# Altium footprint library ACB_PcbLib.PcbLib: 152 footprints (part 9 of 10)
Each footprint in its own frame and in the unit in brackets; x right, y up, seen from the top. Pads: shape width x height; smd on the part's side, far side on the other; paste and mask are expansions set on the pad; w line width, h text height; cw(c..) or ccw(c..) is an arc to the next point about the centre after c.
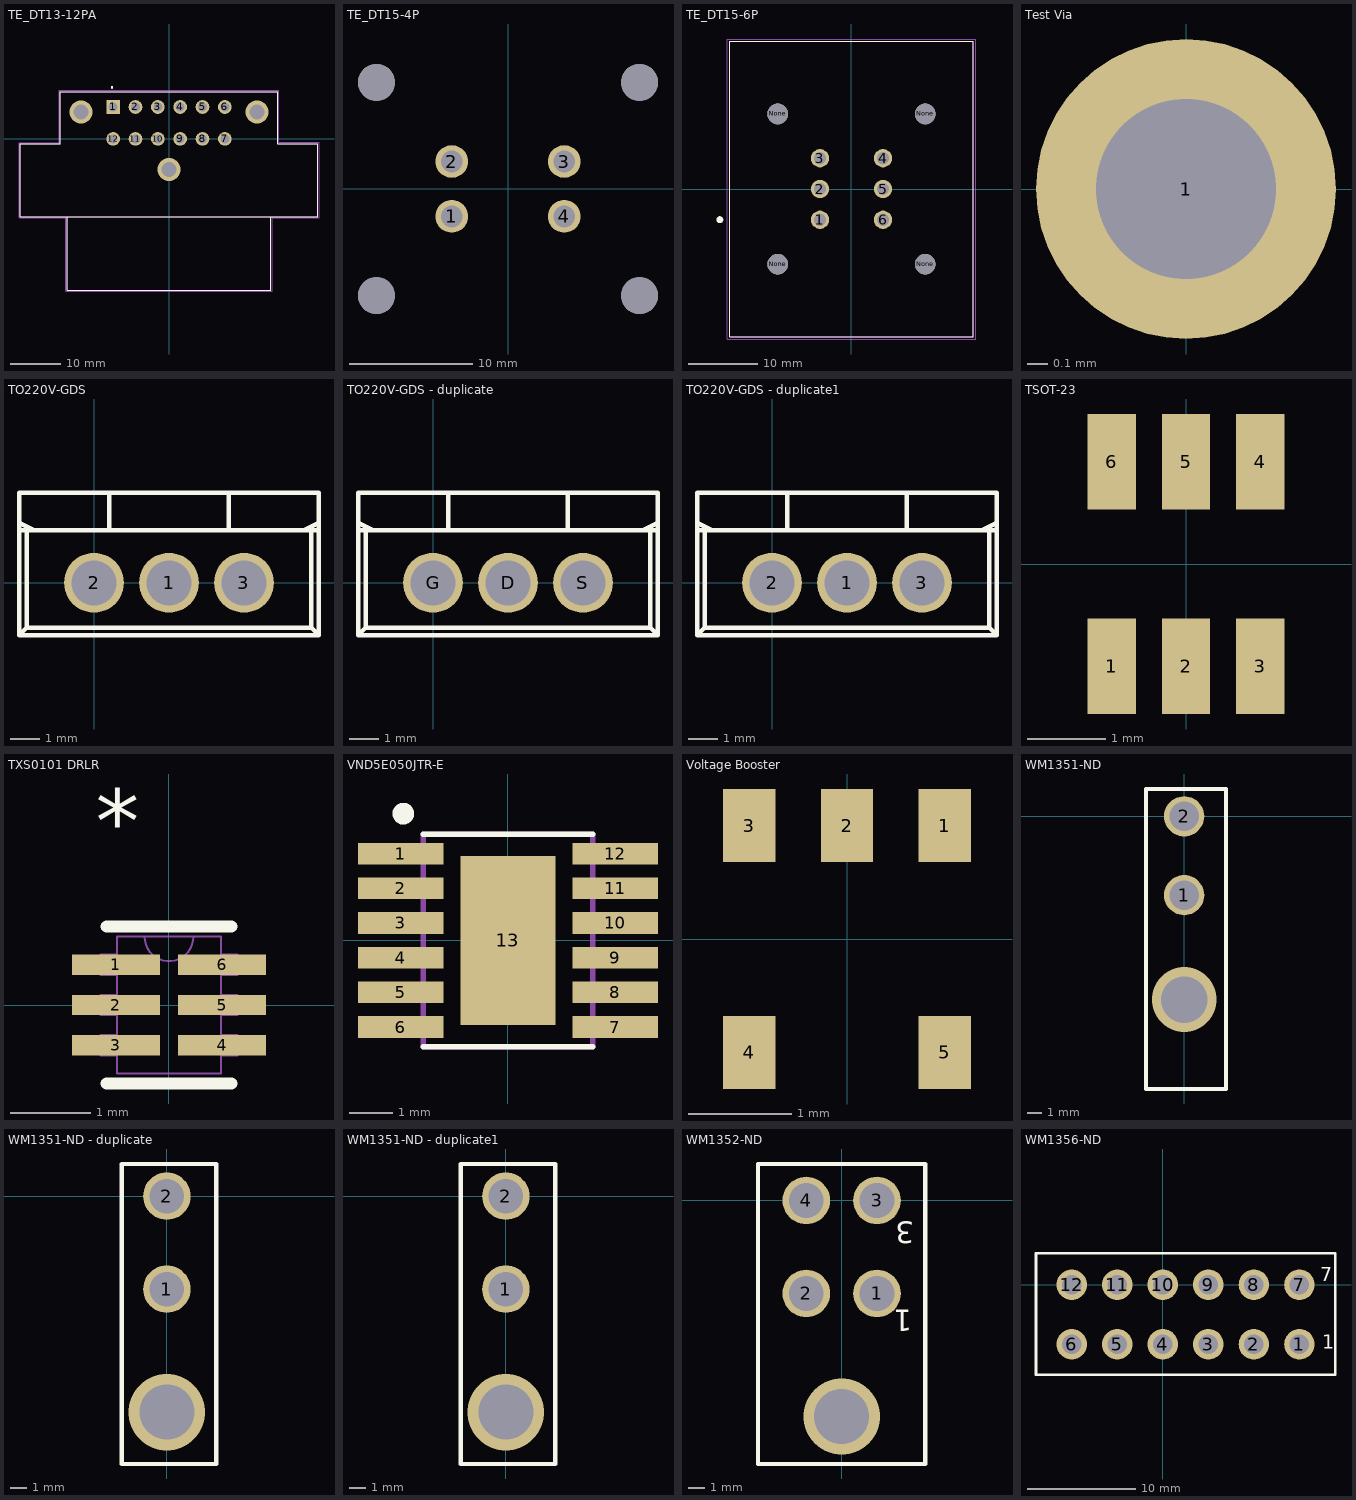
[diagram p8: the footprints below, top view; thin cyan lines are the x and y axes]

## TE_DT13-12PA [mm]
pads (12):
  rect 2.715x2.715 hole 1.81: 1(-11.115,6.35)
  round 2.715 hole 1.81: 2(-6.67,6.35) 3(-2.225,6.35) 4(2.225,6.35) 5(6.67,6.35) 6(11.115,6.35) 7(11.115,0) 8(6.67,0) 9(2.225,0) 10(-2.225,0) 11(-6.67,0) 12(-11.115,0)
via -17.54,5.34 diameter 4.572 hole 2.99
via 17.54,5.34 diameter 4.572 hole 2.99
via 0,-6.1 diameter 4.572 hole 2.99
Top Overlay:
  circle w0.2: c-11.35,10.25 r0.158
  lines w0.127: -20.28,-15.49 20.28,-15.49 ; -20.28,-15.49 -29.605,-15.49 -29.605,-1 -21.605,-1 -21.605,9.4 21.605,9.4 21.605,-1 29.605,-1 29.605,-15.49 20.28,-15.49 ; -20.28,-15.49 -20.28,-30.1 20.28,-30.1 20.28,-15.49
Mechanical 4:
  lines w0.127: -29.605,-15.49 -20.28,-15.49 ; -29.605,-15.49 -29.605,-1 ; -29.605,-15.49 -20.28,-15.49 ; -29.605,-15.49 -29.605,-1 ; -29.605,-1 -21.605,-1 ; -29.605,-1 -21.605,-1 ; -21.605,-1 -21.605,9.4 ; -21.605,-1 -21.605,9.4 ; -21.605,9.4 21.605,9.4 ; -21.605,9.4 21.605,9.4 ; -20.28,-30.1 -20.28,-15.49 ; -20.28,-30.1 20.28,-30.1 ; -20.28,-30.1 -20.28,-15.49 ; -20.28,-30.1 20.28,-30.1 ; -20.28,-15.49 20.28,-15.49 ; -20.28,-15.49 20.28,-15.49 ; 20.28,-30.1 20.28,-15.49 ; 20.28,-30.1 20.28,-15.49 ; 20.28,-15.49 29.605,-15.49 ; 20.28,-15.49 29.605,-15.49 ; 21.605,-1 21.605,9.4 ; 21.605,-1 29.605,-1 ; 21.605,-1 21.605,9.4 ; 21.605,-1 29.605,-1 ; 29.605,-15.49 29.605,-1 ; 29.605,-15.49 29.605,-1
Mechanical 16:
  lines w0.05: -29.855,-15.74 -20.53,-15.74 -20.53,-30.35 20.53,-30.35 20.53,-15.74 29.855,-15.74 29.855,-0.7 21.85,-0.7 21.85,9.65 -21.85,9.65 -21.85,-0.75 -29.855,-0.75 -29.855,-15.74
3D body "c-dt13-12pa-g003-99-3d.stp": height 35.41, standoff -3.17, extent -29.632,-30.074 29.575,9.423

## TE_DT15-4P [mm]
pads (8):
  round 2.655 hole 1.77: 1(-4.56,-2.225) 2(-4.56,2.225) 3(4.56,2.225) 4(4.56,-2.225)
  round 2.99 hole 2.99 unplated: ""(-10.67,-8.655) ""(-10.67,8.645) ""(10.67,-8.655) ""(10.67,8.645)

## TE_DT15-6P [mm]
pads (10):
  round 2.655 hole 1.77: 1(-4.56,-4.45) 2(-4.56,0) 3(-4.56,4.45) 4(4.56,4.45) 5(4.56,0) 6(4.56,-4.45)
  round 2.99 hole 2.99 unplated: None(-10.67,-10.88) None(-10.67,10.86) None(10.67,-10.88) None(10.67,10.86)
Top Overlay:
  circle w0.5: c-19.05,-4.44 r0.25
  lines w0.127: -17.625,-21.395 17.625,-21.395 17.625,21.395 -17.625,21.395 -17.625,-21.395
Mechanical 4:
  lines w0.127: -17.625,-21.395 17.625,-21.395 ; -17.625,-21.395 -17.625,21.395 ; -17.625,-21.395 17.625,-21.395 ; -17.625,-21.395 -17.625,21.395 ; -17.625,21.395 17.625,21.395 ; -17.625,21.395 17.625,21.395 ; 17.625,-21.395 17.625,21.395 ; 17.625,-21.395 17.625,21.395
Mechanical 16:
  lines w0.05: -18,-21.7 -18,21.7 18,21.7 18,-21.7 -18,-21.7

## Test Via [mm] "Test Via Hole"
pads (1):
  round 1.5 hole 0.9: 1(0,0)

## TO220V-GDS [mil]
pads (3):
  round 80 hole 60: 1(100,0) 2(0,0) 3(200,0)
Top Overlay:
  lines w6: -100,70 -80,70 ; -100,80 -80,70 ; -90,70 -90,-60 ; 20,120 20,70 100,70 ; 180,120 180,70 100,70 ; 290,70 290,-60 ; 300,70 280,70 ; 300,80 280,70 ; -100,-70 -90,-60 ; -100,-70 -100,120 100,120 300,120 300,-70 ; -100,-70 100,-70 300,-70 ; -90,-60 100,-60 290,-60 ; -80,70 100,70 ; 100,70 280,70 ; 290,-60 300,-70
3D body: height 920, standoff 320, extent -100,70 300,120
3D body: height 670, standoff 320, extent -100,-70 300,70
3D body: height 160, standoff -120, extent 180,-20 220,20
3D body: height 320, standoff 160, extent 165,-20 235,20
3D body: height 320, standoff 160, extent 65,-20 135,20
3D body: height 160, standoff -120, extent 80,-20 120,20
3D body: height 320, standoff 160, extent -35,-20 35,20
3D body: height 160, standoff -120, extent -20,-20 20,20

## TO220V-GDS - duplicate [mil]
pads (3):
  round 80 hole 60: D(100,0) G(0,0) S(200,0)
Top Overlay:
  lines w6: -100,70 -80,70 ; -100,80 -80,70 ; -90,70 -90,-60 ; 20,120 20,70 100,70 ; 180,120 180,70 100,70 ; 290,70 290,-60 ; 300,70 280,70 ; 300,80 280,70 ; -100,-70 -90,-60 ; -100,-70 -100,120 100,120 300,120 300,-70 ; -100,-70 100,-70 300,-70 ; -90,-60 100,-60 290,-60 ; -80,70 100,70 ; 100,70 280,70 ; 290,-60 300,-70
3D body: height 920, standoff 320, extent -100,70 300,120
3D body: height 670, standoff 320, extent -100,-70 300,70
3D body: height 160, standoff -120, extent 180,-20 220,20
3D body: height 320, standoff 160, extent 165,-20 235,20
3D body: height 320, standoff 160, extent 65,-20 135,20
3D body: height 160, standoff -120, extent 80,-20 120,20
3D body: height 320, standoff 160, extent -35,-20 35,20
3D body: height 160, standoff -120, extent -20,-20 20,20

## TO220V-GDS - duplicate1 [mil]
pads (3):
  round 80 hole 60: 1(100,0) 2(0,0) 3(200,0)
Top Overlay:
  lines w6: -100,70 -80,70 ; -100,80 -80,70 ; -90,70 -90,-60 ; 20,120 20,70 100,70 ; 180,120 180,70 100,70 ; 290,70 290,-60 ; 300,70 280,70 ; 300,80 280,70 ; -100,-70 100,-70 300,-70 ; -100,-70 -100,120 100,120 300,120 300,-70 ; -100,-70 -90,-60 ; -90,-60 100,-60 290,-60 ; -80,70 100,70 ; 100,70 280,70 ; 290,-60 300,-70
3D body: height 160, standoff -120, extent -20,-20 20,20
3D body: height 320, standoff 160, extent -35,-20 35,20
3D body: height 160, standoff -120, extent 80,-20 120,20
3D body: height 320, standoff 160, extent 65,-20 135,20
3D body: height 320, standoff 160, extent 165,-20 235,20
3D body: height 160, standoff -120, extent 180,-20 220,20
3D body: height 670, standoff 320, extent -100,-70 300,70
3D body: height 920, standoff 320, extent -100,70 300,120

## TSOT-23 [mm]
pads (6):
  rect 0.62x1.22 smd: 1(-0.95,-1.31) 2(0,-1.31) 3(0.95,-1.31) 4(0.95,1.31) 5(0,1.31) 6(-0.95,1.31)
3D body: height 1, standoff 0, extent -1.45,-0.85 1.45,0.85

## TXS0101 DRLR [mil]
pads (6):
  rect 43x10 smd: 1(-26,19.68) 2(-26,0) 3(-26,-19.68) 4(26,-19.68) 5(26,0) 6(26,19.68)
Top Overlay:
  lines w6: -30.5,-38.5 30.5,-38.5 ; -30.5,38.5 30.5,38.5
  text "*" at -36,74.69 h31.25
Mechanical 1:
  lines w1: -12,33.5 ccw(c0,33.5) 12,33.5 ; -33.5,-24.68 -33.5,-14.69 -25.5,-14.69 -25.5,-24.68 -33.5,-24.68 ; -33.5,-5 -33.5,5 -25.5,5 -25.5,-5 -33.5,-5 ; -33.5,14.69 -33.5,24.68 -25.5,24.68 -25.5,14.69 -33.5,14.69 ; -25.5,-33.5 25.5,-33.5 25.5,33.5 -25.5,33.5 -25.5,-33.5 ; 25.5,-24.68 25.5,-14.69 33.5,-14.69 33.5,-24.68 25.5,-24.68 ; 25.5,-5 25.5,5 33.5,5 33.5,-5 25.5,-5 ; 25.5,14.69 25.5,24.68 33.5,24.68 33.5,14.69 25.5,14.69
  text "*" at -10.5,30.5 h31.25

## VND5E050JTR-E [mm]
pads (13):
  rect 1.97x0.5 smd: 1(-2.475,2) 2(-2.475,1.2) 3(-2.475,0.4) 4(-2.475,-0.4) 5(-2.475,-1.2) 6(-2.475,-2) 7(2.475,-2) 8(2.475,-1.2) 9(2.475,-0.4) 10(2.475,0.4) 11(2.475,1.2) 12(2.475,2)
  rect 2.2x3.9 smd: 13(0,0)
Top Overlay:
  circle w0.25: c-2.413,2.921 r0.125
  lines w0.127: -1.95,-2.45 1.95,-2.45 ; -1.95,2.45 1.95,2.45
Top Paste:
  region: -0.661,1.05 0.645,1.05 0.645,-1.076 -0.661,-1.076
Mechanical 4:
  lines w0.127: -1.95,-2.45 1.95,-2.45 ; -1.95,-2.45 -1.95,2.45 ; -1.95,-2.45 1.95,-2.45 ; -1.95,-2.45 -1.95,2.45 ; -1.95,2.45 1.95,2.45 ; -1.95,2.45 1.95,2.45 ; 1.95,-2.45 1.95,2.45 ; 1.95,-2.45 1.95,2.45

## Voltage Booster [mil]
pads (5):
  rect 20x28 smd: 1(37.5,43.5) 2(0,43.5) 3(-37.5,43.5) 4(-37.5,-43.5) 5(37.5,-43.5)

## WM1351-ND [mil]
pads (2):
  round 111 hole 81: 1(0,-217) 2(0,0)
via 0,-504 diameter 178 hole 128
Top Overlay:
  lines w10: -105,-750 -105,75 115,75 115,-750 -105,-750
3D body "WM1351-ND.stp": height 448.82, standoff -141.73, extent -108.35,-767.42 120,17.42

## WM1351-ND - duplicate [mil]
pads (2):
  round 111 hole 81: 1(0,-217) 2(0,0)
via 0,-504 diameter 178 hole 128
Top Overlay:
  lines w10: -105,-625 -105,75 115,75 115,-625 -105,-625
3D body "WM1351-ND.stp": height 448.82, standoff -141.73, extent -108.35,-767.42 120,17.42

## WM1351-ND - duplicate1 [mil]
pads (2):
  round 111 hole 81: 1(0,-217) 2(0,0)
via 0,-504 diameter 178 hole 128
Top Overlay:
  lines w10: -105,-625 -105,75 115,75 115,-625 -105,-625
3D body "WM1351-ND.stp": height 448.82, standoff -141.73, extent -108.35,-767.42 120,17.42

## WM1352-ND [mil]
pads (4):
  round 111 hole 81: 1(82.5,-217) 2(-82.5,-217) 3(82.5,0) 4(-82.5,0)
via 0,-504 diameter 178 hole 128
Top Overlay:
  lines w10: -195,-615 195,-615 195,85 -195,85 -195,-615
  text "1" at 165,-255 h50
  text "3" at 170,-50 h50
3D body "039301040.stp": height 448.82, standoff -141.73, extent -184.25,-767.41 209.45,17.43

## WM1356-ND [mm]
pads (12):
  round 2.819 hole 1.8: 1(12.6,-5.5) 2(8.4,-5.5) 3(4.2,-5.5) 4(0,-5.5) 5(-4.2,-5.5) 6(-8.4,-5.5) 7(12.6,0) 8(8.4,0) 9(4.2,0) 10(0,0) 11(-4.2,0) 12(-8.4,0)
Top Overlay:
  lines w0.254: -11.7,-8.3 15.9,-8.3 15.9,2.9 -11.7,2.9 -11.7,-8.3
  text "7" at 14.5,0.3 h1.27
  text "1" at 14.7,-5.9 h1.27
3D body "039281123.stp": height 12.8, standoff -3.5, extent -11.5,-7.7 15.7,3.3